# Altium schematic symbol library comp_lib.SchLib: 9 symbols
Pins are listed as number, name and electrical type; pins without a type are passive.

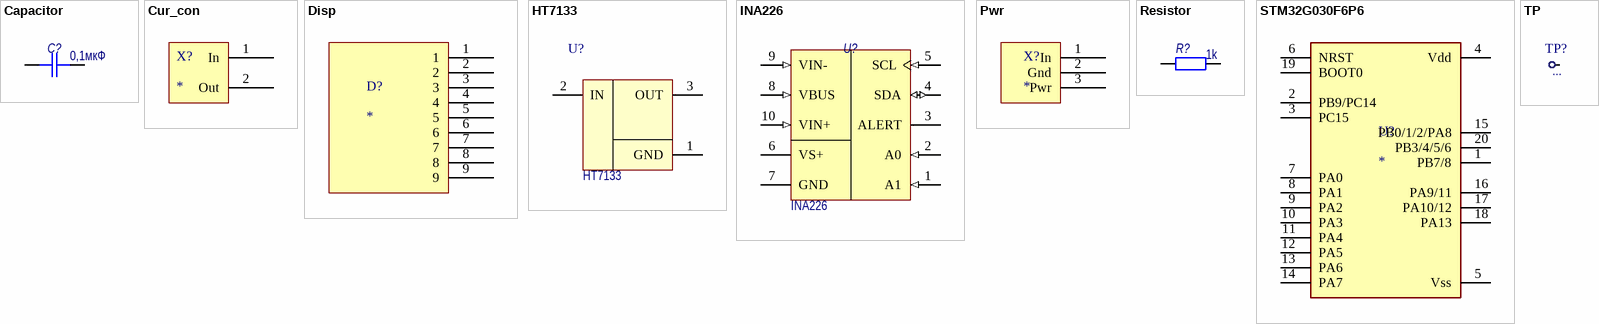
[diagram p0: symbols Capacitor to TP]

## Capacitor
designator C?, comment value 0,1мкФ  (hidden comment: K10-79)
Capacitor; Назначение: SMD-конденсатор; Наименование: К10-79; Потребление, Вт: 0; Точность: %; Напряжение: В; Диэлектрик: *
footprint SMD_C0402
footprint SMD_C0603
footprint SMD_C0805
footprint SMD_C1206
footprint SMD_C1206-C0805
pins: 1, 2

## Cur_con
designator X?
footprint Cur_con
pins: 1 In, 2 Out

## Disp
designator D?
footprint Disp_7x6_seg
pins: 1, 2, 3, 4, 5, 6, 7, 8, 9

## HT7133
designator U?
Low-drop linear regulator; Назначение: Линейный регулятор; Потребление, Вт: 0,100; ComponentLink1Description: DataSheet; ComponentLink1URL: https://www.radiant.su/files/images/Kremhij-marketing/1278EP1T.pdf; Наименование: HT7133
footprint SOT89 (SOT89, 3-Leads, Body 4,50x2,45mm, Pitch 1,50mm, Lead Span 4,1mm, IPC Medium Density)
footprint SOT-223 (SOT223, 4-Leads, Body 6,50x7,00mm (avg), Pitch 2,30mm, IPC Medium Density)
pins: 1 GND, 2 IN, 3 OUT

## INA226
designator U?
High- or Low-Side Measurement, Bidirectional Current and Power Monitor With I2C Interface; Назначение: High-Side or Low-Side Measurement,; Потребление, Вт: 0,001; ComponentLink1Description: Data sheet; ComponentLink1URL: http://www.ti.com/lit/ds/symlink/ina226.pdf; DataSheet: https://www.ti.com/lit/ds/symlink/ina226.pdf?ts=1592809211957&ref_url=https%253A%252F%252Fwww.google.com%252F; Наименование: INA226
footprint VSSOP-10 (Small Outline Package, 8-pin, 3x3mm, 1.1mm height)
pins: 1 A1 (in) "Address pin. Connect to GND, SCL, SDA, or VS.", 2 A0 (in) "Address pin. Connect to GND, SCL, SDA, or VS.", 3 ALERT (oc) "Multi-functional alert, open-drain output.", 4 SDA (io) "Serial bus data line, open-drain input/output.", 5 SCL (in) "Serial bus clock line, open-drain input.", 6 VS+ (power) "Power supply, 2.7V to 5.5V.", 7 GND (power) "Ground.", 8 VBUS (in) "Bus voltage input.", 9 VIN- (in) "Negative differential shunt voltage. Connect to negative side of shunt resistor.", 10 VIN+ (in) "Positive differential shunt voltage. Connect to positive side of shunt resistor."

## Pwr
designator X?
footprint Pwr_con
pins: 1 In, 2 Gnd, 3 Pwr

## Resistor
designator R?, comment value 1k  (hidden comment: OSM R1-8)
Resistor; Наименование: ОСМ Р1-12; Назначение: SMD-резистор; Потребление, Вт: 0,001; Точность: %
footprint SMD_0402
footprint SMD_0603
footprint SMD_0805
footprint SMD_1206
footprint SMD_1206-0805
footprint SMD_6332 (Chip Resistor, Body 6.3x3.2mm, IPC High Density)
footprint SMD_1210
pins: 1, 2

## STM32G030F6P6
designator U?
32-bit ARM Cortex-M0 MCU; Price: None; Package: TSSOP-20; Value: *
footprint TSSOP_20
pins: 1 PB7/8, 2 PB9/PC14, 3 PC15, 4 Vdd, 5 Vss, 6 NRST, 7 PA0, 8 PA1, 9 PA2, 10 PA3, 11 PA4, 12 PA5, 13 PA6, 14 PA7, 15 PB0/1/2/PA8, 16 PA9/11, 17 PA10/12, 18 PA13, 19 BOOT0, 20 PB3/4/5/6

## TP
designator TP?, comment ...
Наименование: Точка проверки; Назначение: Контроль параметров платы; TP_Name: ...
footprint TestPoint
footprint TP_HOLE_1_05
footprint TP_PAD_1
pins: 0 TP